# EAGLE library part MMPQ3904 (library madhu)
Quad 2N3904 transistor array
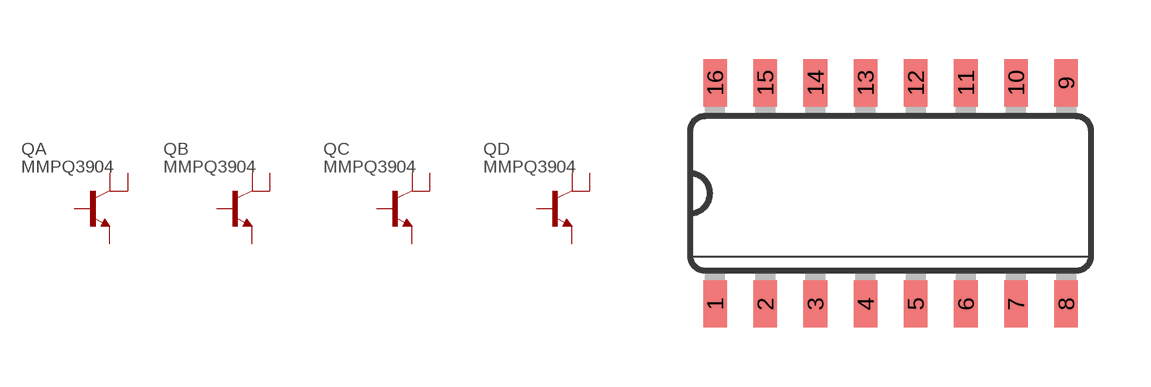
[diagram p10: symbol with the pads of SOIC-16; footprint SOIC-16]

Designator prefix Q; gates A=NPN2C B=NPN2C C=NPN2C D=NPN2C

## MMPQ3904  [SOIC-16]
1  A:C1  pas
2  A:C2  pas
3  B:C1  pas
4  B:C2  pas
5  C:C1  pas
6  C:C2  pas
7  D:C1  pas
8  D:C2  pas
9  D:B  pas
10  D:E  pas
11  C:B  pas
12  C:E  pas
13  B:B  pas
14  B:E  pas
15  A:B  pas
16  A:E  pas

## Footprint SOIC-16 (pad centres in mm)
Small Outline package 150 mil
smd 0.6 x 1.2: 1 -4.445,-2.8; 2 -3.175,-2.8; 3 -1.905,-2.8; 4 -0.635,-2.8; 5 0.635,-2.8; 6 1.905,-2.8; 7 3.175,-2.8; 8 4.445,-2.8; 9 4.445,2.8; 10 3.175,2.8; 11 1.905,2.8; 12 0.635,2.8; 13 -0.635,2.8; 14 -1.905,2.8; 15 -3.175,2.8; 16 -4.445,2.8